# Altium footprint library Game_Controller.PcbLib: 19 footprints (part 2 of 2)
Each footprint in its own frame and in the unit in brackets; x right, y up, seen from the top. Pads: shape width x height; smd on the part's side, far side on the other; paste and mask are expansions set on the pad; w line width, h text height; cw(c..) or ccw(c..) is an arc to the next point about the centre after c.
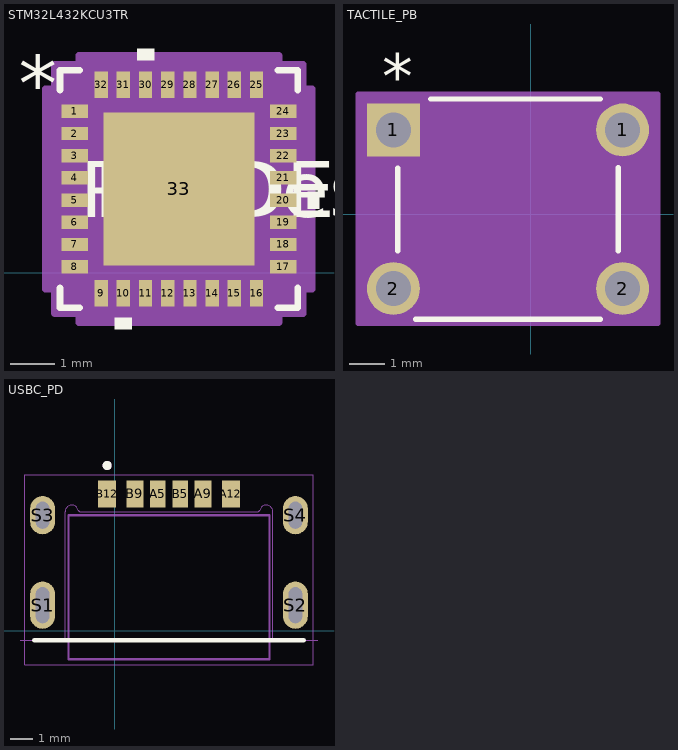
[diagram p1: the footprints below, top view; thin cyan lines are the x and y axes]

## STM32L432KCU3TR [mm]
pads (33):
  rect 0.6x0.3 smd paste-0.15 mask-0.305: 1(4.297,3.639) 2(4.297,3.139) 3(4.297,2.639) 4(4.297,2.139) 5(4.297,1.639) 6(4.297,1.138) 7(4.297,0.638) 8(4.297,0.138) 17(8.997,0.138) 18(8.997,0.638) 19(8.997,1.138) 20(8.997,1.639) 21(8.997,2.139) 22(8.997,2.639) 23(8.997,3.139) 24(8.997,3.639)
  rect 0.3x0.6 smd paste-0.15 mask-0.305: 9(4.897,-0.461) 10(5.397,-0.461) 11(5.897,-0.461) 12(6.397,-0.461) 13(6.897,-0.461) 14(7.397,-0.461) 15(7.897,-0.461) 16(8.397,-0.461) 25(8.397,4.239) 26(7.897,4.239) 27(7.397,4.239) 28(6.897,4.239) 29(6.397,4.239) 30(5.897,4.239) 31(5.397,4.239) 32(4.897,4.239)
  rect 3.4x3.45 smd paste-1.712 mask+0: 33(6.647,1.889)
Top Layer:
  region: 6.647,3.614
  region: 6.647,0.164
Top Overlay:
  region: 5.587,-1.015 5.206,-1.015 5.206,-1.269 5.587,-1.269
  region: 9.551,1.829 9.805,1.829 9.805,1.448 9.551,1.448
  region: 6.087,4.793 5.706,4.793 5.706,5.047 6.087,5.047
  lines w0.152: 3.97,-0.343 3.97,-0.788 4.415,-0.788 ; 3.97,4.121 3.97,4.566 4.415,4.566 ; 8.878,-0.788 9.324,-0.788 9.324,-0.343 ; 8.878,4.566 9.324,4.566 9.324,4.121
  text "*" at 3.044,3.635 h1.27
  text "REFDES" at 4.424,1.254 h1.27
  text "RefDes" at 4.742,1.254 h1.27
Top Paste:
  region: 6.547,3.514 5.047,3.514 5.047,1.989 6.547,1.989
  region: 6.547,1.789 5.047,1.789 5.047,0.264 6.547,0.264
  region: 8.247,3.514 6.747,3.514 6.747,1.989 8.247,1.989
  region: 8.247,1.789 6.747,1.789 6.747,0.264 8.247,0.264
  region: 6.647,3.614
  region: 6.647,3.614
  region: 6.647,0.164
  region: 6.647,0.164
Top Solder:
  region: 6.647,3.614
  region: 6.647,0.164
Mechanical 13:
  lines w0.025: 4.097,3.169 5.367,4.439 ; 4.097,-0.661 9.197,-0.661 9.197,4.439 4.097,4.439 4.097,-0.661
  text "*" at 4.279,3.635 h1.27
  text "RefDes2" at 4.424,1.254 h1.27
Mechanical 15:
  region: 4.389,-0.915 3.843,-0.915 3.843,-0.37 3.639,-0.37 3.639,4.147 3.843,4.147 3.843,4.693 4.389,4.693 4.389,4.897 8.905,4.897 8.905,4.693 9.451,4.693 9.451,4.147 9.655,4.147 9.655,-0.37 9.451,-0.37 9.451,-0.915 8.905,-0.915 8.905,-1.119 4.389,-1.119
  lines w0.152: 3.639,-0.37 3.639,4.147 3.843,4.147 3.843,4.693 4.389,4.693 4.389,4.897 8.905,4.897 8.905,4.693 9.451,4.693 9.451,4.147 9.655,4.147 9.655,-0.37 9.451,-0.37 9.451,-0.915 8.905,-0.915 8.905,-1.119 4.389,-1.119 4.389,-0.915 3.843,-0.915 3.843,-0.37 3.639,-0.37

## TACTILE_PB [mil]
pads (4):
  rect 59x59 hole 39 paste-99999 mask+0: 1(-153.4,94.22)
  round 59 hole 39 paste-99999 mask-29.5: 1(102.5,94.22) 2(-153.4,-82.95) 2(102.5,-82.95)
Top Overlay:
  lines w6: -148.45,-40.63 -148.45,51.62 ; -128.3,-117.36 77.4,-117.36 ; -111.76,128.64 77.4,128.64 ; 97.55,-40.63 97.55,51.91
  text ".Designator" at -162.95,-19.36 h50
  text "*" at -165.9,128.72 h50
Mechanical 13:
  lines w1: -37.45,123.64 ccw(c-25.45,123.64) -13.45,123.64 ; -172.9,-102.45 -143.45,-102.45 -143.45,-63.45 -172.9,-63.45 -172.9,-102.45 ; -172.9,74.72 -143.45,74.72 -143.45,113.72 -172.9,113.72 -172.9,74.72 ; -143.45,-112.36 -143.45,123.64 92.55,123.64 92.55,-112.36 -143.45,-112.36 ; 92.55,-102.45 122,-102.45 122,-63.45 92.55,-63.45 92.55,-102.45 ; 92.55,74.72 122,74.72 122,113.72 92.55,113.72 92.55,74.72
  text ".Designator" at -162.95,-19.36 h50
  text "*" at -120,72.05 h50
Mechanical 15:
  region: 102.5,-121.95 142,-121.95 142,134.05 102.5,134.05 102.5,133.64 -153.45,133.64 -153.4,134.05 -192.9,134.05 -192.9,-121.95 -153.4,-121.95 -153.45,-122.36 102.5,-122.36
  lines w6: -192.9,-121.95 142,-121.95 142,134.05 -192.9,134.05 -192.9,-121.95

## USBC_PD [mm]
pads (10):
  rect 0.7x1.2 smd: A5(1.913,6.093) B5(2.913,6.093)
  rect 0.76x1.2 smd: A9(3.933,6.093) B9(0.893,6.093)
  rect 0.8x1.2 smd: A12(5.163,6.093) B12(-0.337,6.093)
  oval 1.1x2.1 hole 0.6 slot 1.6 at 90 deg: S1(-3.207,1.143) S2(8.033,1.143)
  oval 1.1x1.7 hole 0.6 slot 1.2 at 90 deg: S3(-3.207,5.143) S4(8.033,5.143)
Top Overlay:
  circle w0.2: c-0.337,7.353 r0.1
  lines w0.2: -3.587,-0.407 8.413,-0.407
Mechanical 1:
  lines w0: -4.207,-0.407 -2.207,-0.407 -2.207,5.293 cw(c-1.907,5.293) -1.616,5.371 ; -1.617,5.373 ccw(c-1.523,5.387) -1.537,5.293 6.363,5.293 ccw(c6.349,5.387) 6.443,5.373 ; 6.442,5.371 cw(c6.733,5.293) 7.033,5.293 7.033,-0.407 9.033,-0.407
Mechanical 13:
  circle w0.2: c-0.337,7.353 r0.1
  lines w0.1: -3.587,-0.407 8.413,-0.407 ; -2.057,-1.257 -2.057,5.143 6.883,5.143 6.883,-1.257 -2.057,-1.257
  text "PCB EDGE" at 9.053,-0.257 h0.41
Mechanical 15:
  lines w0.05: -4.007,-1.507 -4.007,6.943 8.833,6.943 8.833,-1.507 -4.007,-1.507
3D body "step_temp.STEP": height 1.56, standoff -1.6, extent -3.357,-1.257 8.183,6.243